# Altium footprint library WE-CSIM.PcbLib: 6 footprints
Each footprint in its own frame and in the unit in brackets; x right, y up, seen from the top. Pads: shape width x height; smd on the part's side, far side on the other; paste and mask are expansions set on the pad; w line width, h text height; cw(c..) or ccw(c..) is an arc to the next point about the centre after c.
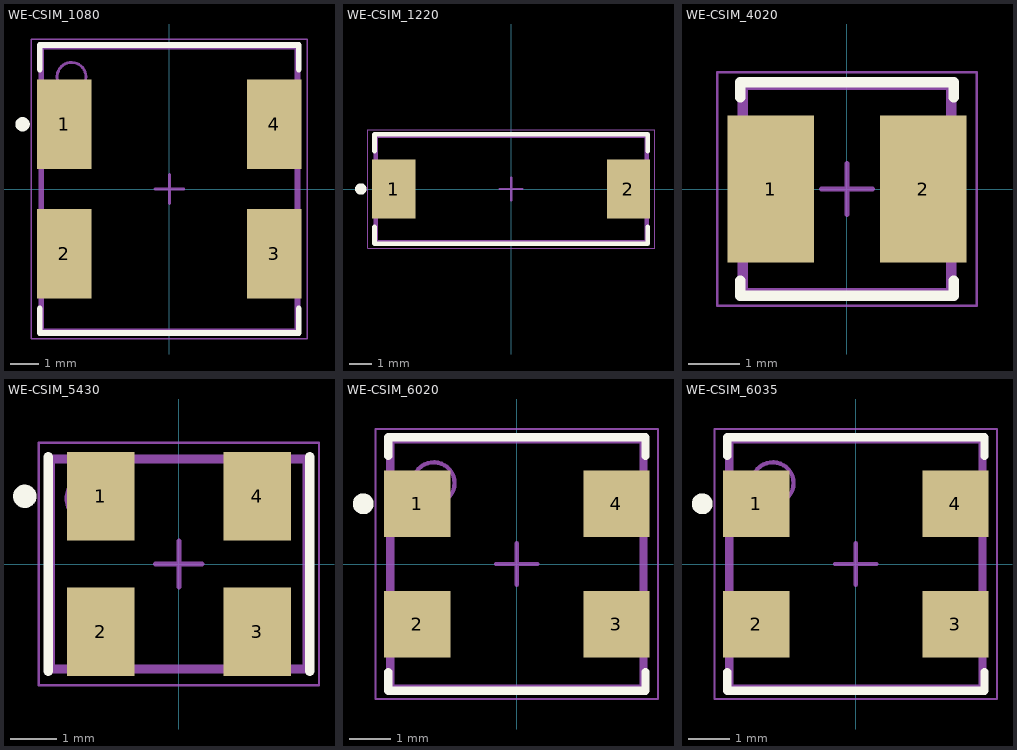
[diagram p0: the footprints below, top view; thin cyan lines are the x and y axes]

## WE-CSIM_1080 [mm] "SMD Inductor, body size 8.80x9.80mm"
height 1.5
pads (4):
  rect 1.9x3.1 smd: 1(-3.65,2.25) 2(-3.65,-2.25) 3(3.65,-2.25) 4(3.65,2.25)
Top Overlay:
  circle w0.25: c-5.1,2.25 r0.125
  lines w0.2: -4.5,-4.15 -4.5,-5 4.5,-5 4.5,-4.15 ; -4.5,4.15 -4.5,5 4.5,5 4.5,4.15
Top Assembly:
  circle w0.1: c-3.4,3.9 r0.5
  lines w0.1: -4.5,-5 -4.5,5 4.5,5 4.5,-5 -4.5,-5
Top Designator:
  text ".Designator" at -3.647,-0.357 h1
Top 3D Body:
  circle w0.1: c-3.4,3.9 r0.5
  lines w0.1: -4.4,-4.9 -4.4,4.9 4.4,4.9 4.4,-4.9 -4.4,-4.9
Top Courtyard:
  lines w0.05: -4.8,5.2 -4.8,-5.2 4.8,-5.2 4.8,5.2 -4.8,5.2 ; -4.8,5.2 -4.8,5.2
Top Component Center:
  lines w0.1: -0.5,0 0.5,0 ; 0,-0.5 0,0.5
3D body "744348xxx.stp": height 9.53, standoff 0.03, extent -4.4,-4.9 4.4,4.9

## WE-CSIM_1220 [mm] "SMD Inductor, body size 11.80 x 4.60 mm"
height 1.9
pads (2):
  rect 1.9x2.6 smd: 1(-5.15,0) 2(5.15,0)
Top Overlay:
  circle w0.25: c-6.6,0 r0.125
  lines w0.2: -6,-1.65 -6,-2.4 6,-2.4 6,-1.65 ; -6,1.65 -6,2.4 6,2.4 6,1.65
Top Assembly:
  circle w0.1: c-4.9,0 r0.5
  lines w0.1: -6,-2.4 6,-2.4 6,2.4 -6,2.4 -6,-2.4
Top Designator:
  text ".Designator" at -3.647,-0.357 h1
Top 3D Body:
  circle w0.1: c-4.9,0 r0.5
  lines w0.1: -5.9,-2.3 5.9,-2.3 5.9,2.3 -5.9,2.3 -5.9,-2.3
Top Courtyard:
  lines w0.05: -6.3,-2.6 6.3,-2.6 6.3,2.6 -6.3,2.6 -6.3,-2.6
Top Component Center:
  lines w0.1: -0.5,0 0.5,0 ; 0,-0.5 0,0.5
3D body "744348xxx.stp": height 1.92, standoff 0.02, extent -5.9,-2.3 5.9,2.3

## WE-CSIM_4020 [mm] "SMD Inductor, body size 4.00 x 4.00 mm"
height 2
pads (2):
  rect 1.7x2.9 smd: 1(-1.5,0) 2(1.5,0)
Top Overlay:
  lines w0.2: -2.1,-1.8 -2.1,-2.1 2.1,-2.1 2.1,-1.8 ; -2.1,1.8 -2.1,2.1 2.1,2.1 2.1,1.8
Top Assembly:
  lines w0.1: -2.1,-2.1 2.1,-2.1 2.1,2.1 -2.1,2.1 -2.1,-2.1
Top Designator:
  text ".Designator" at -3.647,-0.357 h1
Top 3D Body:
  lines w0.1: -2,-2 2,-2 2,2 -2,2 -2,-2
Top Courtyard:
  lines w0.05: -2.55,-2.3 2.55,-2.3 2.55,2.3 -2.55,2.3 -2.55,-2.3
Top Component Center:
  lines w0.1: -0.5,0 0.5,0 ; 0,-0.5 0,0.5
3D body "744348xxx_4020.stp": height 2.07, standoff 0.02, extent -2,-2 2,2

## WE-CSIM_5430 [mm] "SMD Inductor, body size 5.40 x 4.40 mm"
height 3
pads (4):
  rect 1.45x1.9 smd: 1(-1.675,1.45) 2(-1.675,-1.45) 3(1.675,-1.45) 4(1.675,1.45)
Top Overlay:
  circle w0.25: c-3.3,1.45 r0.125
  lines w0.2: -2.8,-2.3 -2.8,2.3 ; 2.8,-2.3 2.8,2.3
Top Assembly:
  circle w0.1: c-1.9,1.4 r0.5
  lines w0.1: -2.8,-2.3 -2.8,2.3 2.8,2.3 2.8,-2.3 -2.8,-2.3
Top Designator:
  text ".Designator" at -3.647,-0.357 h1
Top 3D Body:
  circle w0.1: c-1.9,1.4 r0.5
  lines w0.1: -2.7,-2.2 -2.7,2.2 2.7,2.2 2.7,-2.2 -2.7,-2.2
Top Courtyard:
  lines w0.05: -3,-2.6 -3,2.6 3,2.6 3,-2.6 -3,-2.6
Top Component Center:
  lines w0.1: -0.5,0 0.5,0 ; 0,-0.5 0,0.5
3D body "744348xxx .stp": height 2.86, standoff 0.01, extent -2.7,-2.2 2.7,2.2

## WE-CSIM_6020 [mm] "SMD Inductor, body size 6.00 x 5.90 mm"
height 1.9
pads (4):
  rect 1.6x1.6 smd: 1(-2.4,1.45) 2(-2.4,-1.45) 3(2.4,-1.45) 4(2.4,1.45)
Top Overlay:
  circle w0.25: c-3.7,1.45 r0.125
  lines w0.2: -3.1,-2.6 -3.1,-3.05 3.1,-3.05 3.1,-2.6 ; -3.1,2.6 -3.1,3.05 3.1,3.05 3.1,2.6
Top Assembly:
  circle w0.1: c-2,1.95 r0.5
  lines w0.1: -3.1,-3.05 -3.1,3.05 3.1,3.05 3.1,-3.05 -3.1,-3.05
Top Designator:
  text ".Designator" at -3.647,-0.357 h1
Top 3D Body:
  circle w0.1: c-2,1.95 r0.5
  lines w0.1: -3,-2.95 -3,2.95 3,2.95 3,-2.95 -3,-2.95
Top Courtyard:
  lines w0.05: -3.4,-3.25 3.4,-3.25 3.4,3.25 -3.4,3.25 -3.4,-3.25
Top Component Center:
  lines w0.1: -0.5,0 0.5,0 ; 0,-0.5 0,0.5
3D body "744348xxx.stp": height 1.97, standoff 0.02, extent -3,-2.95 3,2.95

## WE-CSIM_6035 [mm] "SMD Inductor, body size 6.00 x 5.90 mm"
height 3.5
pads (4):
  rect 1.6x1.6 smd: 1(-2.4,1.45) 2(-2.4,-1.45) 3(2.4,-1.45) 4(2.4,1.45)
Top Overlay:
  circle w0.25: c-3.7,1.45 r0.125
  lines w0.2: -3.1,-2.6 -3.1,-3.05 3.1,-3.05 3.1,-2.6 ; -3.1,2.6 -3.1,3.05 3.1,3.05 3.1,2.6
Top Assembly:
  circle w0.1: c-2,1.95 r0.5
  lines w0.1: -3.1,-3.05 3.1,-3.05 3.1,3.05 -3.1,3.05 -3.1,-3.05
Top Designator:
  text ".Designator" at -3.647,-0.357 h1
Top 3D Body:
  circle w0.1: c-2,1.95 r0.5
  lines w0.1: -3,-2.95 3,-2.95 3,2.95 -3,2.95 -3,-2.95
Top Courtyard:
  lines w0.05: -3.4,-3.25 -3.4,3.25 3.4,3.25 3.4,-3.25 -3.4,-3.25
Top Component Center:
  lines w0.1: -0.5,0 0.5,0 ; 0,-0.5 0,0.5
3D body "74434860352135.stp": height 3.57, standoff 0.02, extent -3,-2.95 3,2.95